# Altium schematic symbol library Schlib1.SchLib: 3 symbols
Pins are listed as number, name and electrical type; pins without a type are passive.

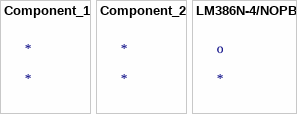
[diagram p0: symbols Component_1 to LM386N-4/NOPB]

## Component_1
designator *

## Component_2
designator *

## LM386N-4/NOPB
designator o
700-mW, mono, 5- to 18-V, analog input Class-AB audio amplifier 8-PDIP 0 to 70; Manufacturer: Texas Instruments; Manufacturer Part Number: LM386N-4/NOPB; Manufacturer Lifecycle Status: ACTIVE; Bandwidth: 300kHz; Gain: 20dB; Input Bias Current: 250nA; Load Impedance: 8Ω; Max Output Power: 1W; Max Power Dissipation: 1.25W; Max Supply Voltage: 18V; Min Supply Voltage: 5V; Nominal Supply Current: 4mA; Number of Channels: 1; Operating Supply Voltage: 12V; Power Supply Rejection Ratio (PSRR): 50dB; Supply Type: Single; Voltage Gain: 46dB; Supplier: DigiKey; Supplier Part Number: 296-43960-5-ND; RoHS: Compliant; Category: Amplifiers - Audio; Stock: 6318; Pricing: 1=1.18, 10=0.852, 40=0.7355, 120=0.67067, 280=0.63268, 520=0.6101, 1000=0.59015, 2520=0.56754, 5000=0.55418 (USD); Case/Package: PDIP; Contact Plating: Tin; Height: 5.08mm; Lead Free: Lead Free; Length: 9.81mm; Lifecycle Status: Production; Max Operating Temperature: 70°C; Min Operating Temperature: 0°C; Pins: 8; Output Power: 1W; Power Dissipation: 1.25W; Quiescent Current: 4mA; Radiation Hardening: No; REACH SVHC: No; Schedule B: 8542330000, 8542330000|8542330000|8542330000|8542330000|8542330000; Thickness: 3.9mm; Weight: 4.535924g; Width: 6.35mm; ComponentLink1URL: https://octopart.com:443/opatz8j6/c1?t=G_wxgqDbSaMwCg5VnixGh5Qh_vJWOYjMeY4AvFEMb7NvUlS34HG7L0cWoMqueKuEFa7H7EyjZWcuRzvnauFdJo92r-2wmJBPJ4fg2dA9pCDhvpL5eUs7Exw8AGEWw6Hm-JXlqs8kEQkvrnH3cJWj_m5p8QqfnWA7abJT7K09uK2NucNYSr4OpasFkGce0FE6KZjTVLST-LBwGGTwNYqYgH9JpJNZt-hioCJqXN1YQWV-FUyM80HnaXTUPEmpGBmeHGmoe1PzdDfl7DcnFAlo8J9INRIwVu94OFCOBoARqWM7HRr83xLsYz_FxQQYmimjG-Uy3j5oHpwq1xpPmRcBbMYTRS7Sju9tlcR1hUhhBgVTf-rZCX2wwzLbJPn9yaIgFh2P&src-supplier=Texas+Instruments; ComponentLink1Description: https://octopart.com:443/opatz8j6/c1?t=G_wxgqDbSaMwCg5VnixGh5Qh_vJWOYjMeY4AvFEMb7NvUlS34HG7L0cWoMqueKuEFa7H7EyjZWcuRzvnauFdJo92r-2wmJBPJ4fg2dA9pCDhvpL5eUs7Exw8AGEWw6Hm-JXlqs8kEQkvrnH3cJWj_m5p8QqfnWA7abJT7K09uK2NucNYSr4OpasFkGce0FE6KZjTVLST-LBwGGTwNYqYgH9JpJNZt-hioCJqXN1YQWV-FUyM80HnaXTUPEmpGBmeHGmoe1PzdDfl7DcnFAlo8J9INRIwVu94OFCOBoARqWM7HRr83xLsYz_FxQQYmimjG-Uy3j5oHpwq1xpPmRcBbMYTRS7Sju9tlcR1hUhhBgVTf-rZCX2wwzLbJPn9yaIgFh2P&src-supplier=Texas+Instruments; ComponentLink2URL: https://sigma.octopart.com:443/49250158/technical_drawing/Texas-Instruments-LM386N-4-NOPB.pdf?src-supplier=Texas+Instruments; ComponentLink2Description: https://sigma.octopart.com:443/49250158/technical_drawing/Texas-Instruments-LM386N-4-NOPB.pdf?src-supplier=Texas+Instruments; ComponentLink3URL: https://datasheet.octopart.com:443/LM386N-4-NOPB-Texas-Instruments-datasheet-94062099.pdf?src-supplier=Upverter; ComponentLink3Description: https://datasheet.octopart.com:443/LM386N-4-NOPB-Texas-Instruments-datasheet-94062099.pdf?src-supplier=Upverter; ComponentLink4URL: https://datasheet.octopart.com:443/LM386N-4/NOPB-Texas-Instruments-datasheet-10848518.pdf?src-supplier=element14; ComponentLink4Description: https://datasheet.octopart.com:443/LM386N-4/NOPB-Texas-Instruments-datasheet-10848518.pdf?src-supplier=element14; ComponentLink5URL: https://datasheet.octopart.com:443/LM386N-4/NOPB-National-Semiconductor-datasheet-11093.pdf?src-supplier=element14; ComponentLink5Description: https://datasheet.octopart.com:443/LM386N-4/NOPB-National-Semiconductor-datasheet-11093.pdf?src-supplier=element14; ComponentLink6URL: https://datasheet.octopart.com:443/LM386N-4-NOPB-Texas-Instruments-datasheet-164415079.pdf?src-supplier=SHENGYU+ELECTRONICS; ComponentLink6Description: https://datasheet.octopart.com:443/LM386N-4-NOPB-Texas-Instruments-datasheet-164415079.pdf?src-supplier=SHENGYU+ELECTRONICS; ComponentLink7URL: https://datasheet.octopart.com:443/LM386N-4-NOPB-Texas-Instruments-datasheet-159115206.pdf?src-supplier=LCSC; ComponentLink7Description: https://datasheet.octopart.com:443/LM386N-4-NOPB-Texas-Instruments-datasheet-159115206.pdf?src-supplier=LCSC; ComponentLink8URL: https://datasheet.octopart.com:443/LM386N-4/NOPB-National-Semiconductor-datasheet-9929271.pdf?src-supplier=RS+(Formerly+Allied+Electronics); ComponentLink8Description: https://datasheet.octopart.com:443/LM386N-4/NOPB-National-Semiconductor-datasheet-9929271.pdf?src-supplier=RS+(Formerly+Allied+Electronics); ComponentLink9URL: https://datasheet.octopart.com:443/LM386N-4-NOPB-Texas-Instruments-datasheet-8817787.pdf?src-supplier=Jameco+(USA); ComponentLink9Description: https://datasheet.octopart.com:443/LM386N-4-NOPB-Texas-Instruments-datasheet-8817787.pdf?src-supplier=Jameco+(USA); ComponentLink10URL: http://sigma.octopart.com:80/reach_statement/Texas-Instruments-company-64.pdf?src-supplier=Compliance+Statements; ComponentLink10Description: http://sigma.octopart.com:80/reach_statement/Texas-Instruments-company-64.pdf?src-supplier=Compliance+Statements; ComponentLink11URL: http://sigma.octopart.com:80/conflict_mineral_statement/Texas-Instruments-company-63.pdf?src-supplier=Compliance+Statements; ComponentLink11Description: http://sigma.octopart.com:80/conflict_mineral_statement/Texas-Instruments-company-63.pdf?src-supplier=Compliance+Statements